# Altium schematic symbol library Buck_Converter_2_Altium1.SCHLIB: 14 symbols
Pins are listed as number, name and electrical type; pins without a type are passive.

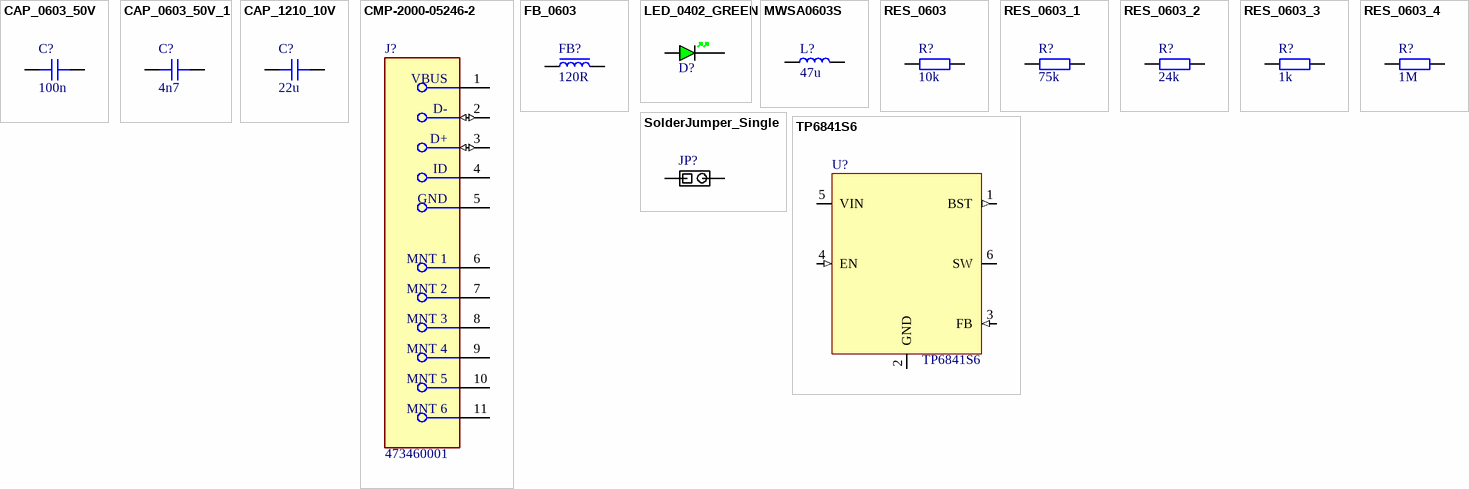
[diagram p0: symbols CAP_0603_50V to TP6841S6]

## CAP_0603_50V
designator C?, comment 100n
Capacitor SMD 0603 50V
footprint FP-C0603X104K5RAC3316-IPC_A
pins: 1, 2

## CAP_0603_50V_1
designator C?, comment 4n7
Capacitor SMD 0603 50V
footprint CAP_0603
footprint FP-C0603X104K5RAC3316-IPC_A
pins: 1, 2

## CAP_1210_10V
designator C?, comment 22u
Capacitor SMD 1210 10V
footprint G-32_MUR
pins: 1, 2

## CMP-2000-05246-2
designator J?, comment 473460001
CONN RCPT USB2.0 MICRO B SMD R/A; Manufacturer: Molex; Conn Orientation: Right Angle; Is Female: yes; Shielding: true; Pitch: 0.65mm; Number Of Contacts: 5; Voltage Rating: 30V; Current Rating: 1.8A; Device Class L2: USB Connectors; Digikey Description: CONN RCPT USB2.0 MICRO B SMD R/A; Height: 2.945mm; RoHS: TRUE; ComponentLink2Description: Datasheet; Octopart: https://octopart.com/47346-0001-molex-7164928; Automotive: No; Package: 0; Category: Conn; Device Class L1: Connectors; Usb Standard: USB 2.0; Temperature: -30°C to +85°C; Temperature Range Low: -30°C; Footprint Url: https://www.molex.com/pdm_docs/sd/473460001_sd.pdf; ComponentLink2URL: https://www.molex.com/webdocs/datasheets/pdf/en-us/0473460001_IO_CONNECTORS.pdf; Lead Free: Yes; Manufacturer Part Number: 473460001; Contact Material: Gold,Nickel; Temperature Range High: +85°C; Device Class L3: unset
footprint CON00679_5_MOL
pins: 1 VBUS (power), 2 D- (io), 3 D+ (io), 4 ID, 5 GND (power), 6 MNT 1, 7 MNT 2, 8 MNT 3, 9 MNT 4, 10 MNT 5, 11 MNT 6

## FB_0603
designator FB?, comment 120R
Ferrite Bead SMD 0603
footprint FB_0603 (Ferrite Bead 0603)
footprint IND_BLM18_0603_MUR
pins: 1, 2

## LED_0402_GREEN
designator D?, comment GREEN  (value not drawn)
LED 0402 GREEN SMD
footprint LED_SM0603UYC
pins: A, K

## MWSA0603S
designator L?, comment 47u
Power Inductor SMD Sunlord MWSA0603S; Manufacturer Part Number: MWSA0603S-; Manufacturer: Sunlord
footprint INDM7066X300N
pins: 1, 2

## RES_0603
designator R?, comment 10k
Resistor SMD 0603
footprint RC0603N_YAG
pins: 1, 2

## RES_0603_1
designator R?, comment 75k
Resistor SMD 0603
footprint RC0603N_YAG
pins: 1, 2

## RES_0603_2
designator R?, comment 24k
Resistor SMD 0603
footprint RC0603N_YAG
pins: 1, 2

## RES_0603_3
designator R?, comment 1k
Resistor SMD 0603
footprint RC0603N_YAG
pins: 1, 2

## RES_0603_4
designator R?, comment 1M
Resistor SMD 0603
footprint RC0603N_YAG
pins: 1, 2

## SolderJumper_Single
designator JP?, comment Solder Jumper  (value not drawn)
Solder Jumper Single 0.5mm Pitch
footprint FCI_68786-202LF
pins: 1, 2

## TP6841S6
designator U?
40V 0.8A 800kHz Synchronous Step-Down Converter; Manufacturer: TECH PUBLIC; Manufacturer Part Number: TP6841S6
footprint SOT95P280X125-6N
pins: 1 BST (out), 2 GND (power), 3 FB (in), 4 EN (in), 5 VIN (power), 6 SW (power)